# Altium footprint library Altium_Box_Header.PcbLib: 219 footprints (part 2 of 14)
Each footprint in its own frame and in the unit in brackets; x right, y up, seen from the top. Pads: shape width x height; smd on the part's side, far side on the other; paste and mask are expansions set on the pad; w line width, h text height; cw(c..) or ccw(c..) is an arc to the next point about the centre after c.
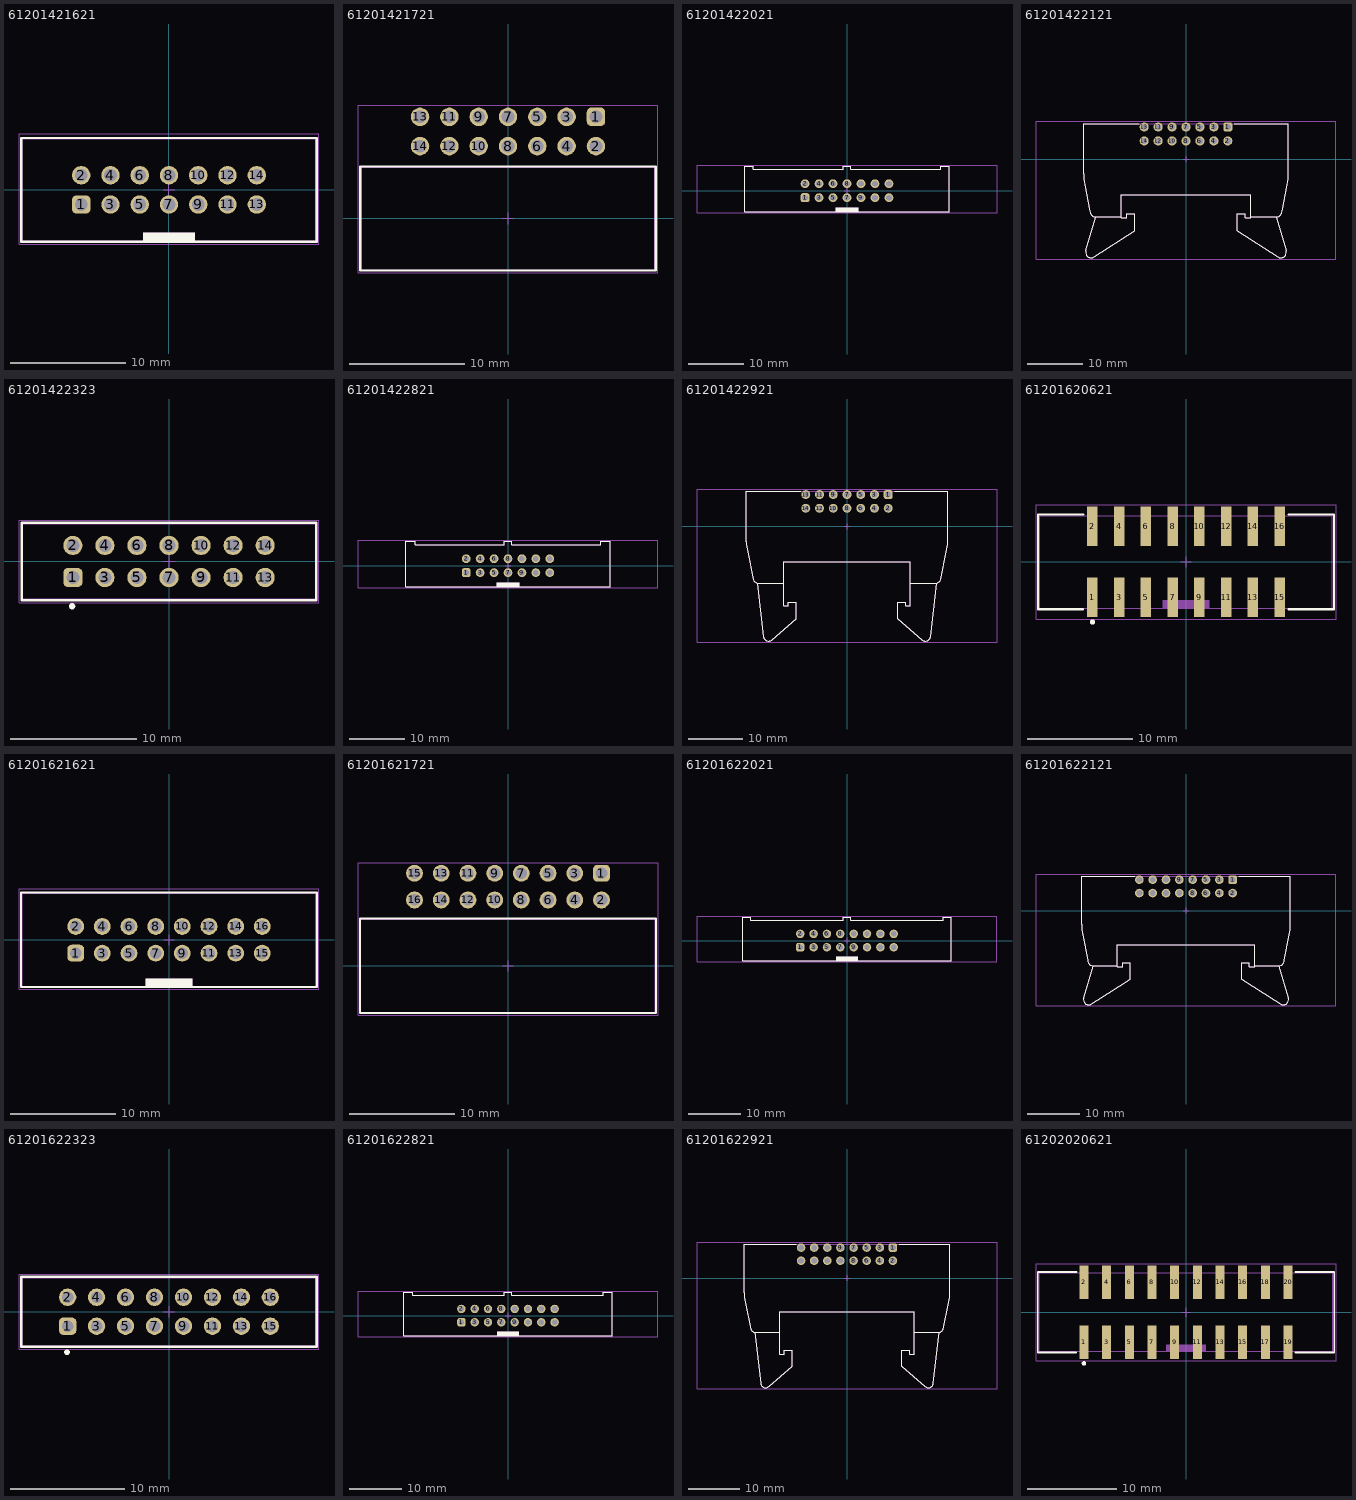
[diagram p1: the footprints below, top view; thin cyan lines are the x and y axes]

## 61201421621 [mm] "14 pins, straight, gold plating"
height 9.1
pads (14):
  rrect50% 1.6x1.6 hole 1.1: 1(-7.62,-1.27)
  round 1.6 hole 1.1: 2(-7.62,1.27) 3(-5.08,-1.27) 4(-5.08,1.27) 5(-2.54,-1.27) 6(-2.54,1.27) 7(0,-1.27) 8(0,1.27) 9(2.54,-1.27) 10(2.54,1.27) 11(5.08,-1.27) 12(5.08,1.27) 13(7.62,-1.27) 14(7.62,1.27)
Top Overlay:
  rectangle: -2.25,-4.5 2.25,-3.7
  lines w0.2: -12.82,-4.5 12.82,-4.5 12.82,4.5 -12.82,4.5 -12.82,-4.5
Top Designator:
  text ".Designator" at -7.498,-0.5 h1.5
Top Component Outline:
  rectangle: -2.25,-4.425 2.25,-3.7
  lines w0.1: -12.72,-4.425 -12.72,4.425 12.72,4.425 12.72,-4.425 -12.72,-4.425
Top 3D Body:
  rectangle: -2.25,-4.425 2.25,-3.7
  lines w0.1: -12.72,-4.425 12.72,-4.425 12.72,4.425 -12.72,4.425 -12.72,-4.425
Top Courtyard:
  lines w0.05: -13.02,-4.7 13.02,-4.7 13.02,4.85 -13.02,4.85 -13.02,-4.7
Top Component Center:
  lines w0.05: -0.5,0 0.5,0 ; 0,-0.5 0,0.5
3D body "61201421621.stp": height 9.13, standoff -2.98, extent -12.72,-4.425 12.72,4.75

## 61201421721 [mm] "14 pins, right angled, gold plating"
height 9.1
pads (14):
  rrect50% 1.6x1.6 hole 1.1: 1(7.62,8.805)
  round 1.6 hole 1.1: 2(7.62,6.265) 3(5.08,8.805) 4(5.08,6.265) 5(2.54,8.805) 6(2.54,6.265) 7(0,8.805) 8(0,6.265) 9(-2.54,8.805) 10(-2.54,6.265) 11(-5.08,8.805) 12(-5.08,6.265) 13(-7.62,8.805) 14(-7.62,6.265)
Top Overlay:
  lines w0.2: -12.795,-4.5 -12.795,4.5 12.795,4.5 12.795,-4.5 -12.795,-4.5
Top Designator:
  text ".Designator" at -7.498,-0.5 h1.5
Top Component Outline:
  lines w0.1: -12.72,-4.425 -12.72,4.425 12.72,4.425 12.72,-4.425 -12.72,-4.425
Top 3D Body:
  lines w0.1: -12.72,-4.425 12.72,-4.425 12.72,4.425 -12.72,4.425 -12.72,-4.425
Top Courtyard:
  lines w0.05: -12.995,-4.7 12.995,-4.7 12.995,9.805 -12.995,9.805 -12.995,-4.7
Top Component Center:
  lines w0.05: -0.5,0 0.5,0 ; 0,-0.5 0,0.5
3D body "61201421721.stp": height 9.23, standoff -2.88, extent -12.72,-4.425 12.72,9.125

## 61201422021 [mm] "14 pins, straight, short lever, gold plating"
height 24.5
pads (14):
  rrect50% 1.6x1.6 hole 1.02: 1(-7.62,-1.27)
  round 1.6 hole 1.02: 2(-7.62,1.27) 3(-5.08,-1.27) 4(-5.08,1.27) 5(-2.54,-1.27) 6(-2.54,1.27) 7(0,-1.27) 8(0,1.27) 9(2.54,-1.27) 10(2.54,1.27) 11(5.08,-1.27) 12(5.08,1.27) 13(7.62,-1.27) 14(7.62,1.27)
Top Overlay:
  rectangle: -2.1,-3.85 2.1,-3.05
  lines w0.2: -0.7,4.45 0.7,4.45 0.7,3.85 16.99,3.85 16.99,4.45 18.54,4.45 18.54,-3.85 -18.54,-3.85 -18.54,4.45 -16.99,4.45 -16.99,3.85 -0.7,3.85 -0.7,4.45 ; -0.7,4.45 -0.7,4.45
Top Designator:
  text ".Designator" at -7.498,-0.5 h1.5
Top Component Outline:
  rectangle: -2.1,-3.85 2.1,-3.05
  lines w0.1: -0.7,4.45 -0.7,3.85 -16.99,3.85 -16.99,4.45 -18.54,4.45 -18.54,-3.85 18.54,-3.85 18.54,4.45 16.99,4.45 16.99,3.85 0.7,3.85 0.7,4.45 -0.7,4.45 ; -0.7,4.45 -0.7,4.45
Top 3D Body:
  rectangle: -2.1,-3.85 2.1,-3.05
  lines w0.1: -0.7,4.45 0.7,4.45 0.7,3.85 16.99,3.85 16.99,4.45 18.54,4.45 18.54,-3.85 -18.54,-3.85 -18.54,4.45 -16.99,4.45 -16.99,3.85 -0.7,3.85 -0.7,4.45 ; -0.7,4.45 -0.7,4.45
Top Courtyard:
  lines w0.05: -27.24,-4.05 27.24,-4.05 27.24,4.65 -27.24,4.65 -27.24,-4.05
Top Component Center:
  lines w0.05: -0.5,0 0.5,0 ; 0,-0.5 0,0.5
3D body "61201422021.stp": height 24.55, standoff -3.35, extent -18.64,-3.85 18.641,4.45

## 61201422121 [mm] "14 pins, right angeled, short lever, gold plating"
height 8.3
pads (14):
  rrect50% 1.65x1.65 hole 1.1: 1(7.62,5.88)
  round 1.65 hole 1.1: 2(7.62,3.34) 3(5.08,5.88) 4(5.08,3.34) 5(2.54,5.88) 6(2.54,3.34) 7(0,5.88) 8(0,3.34) 9(-2.54,5.88) 10(-2.54,3.34) 11(-5.08,5.88) 12(-5.08,3.34) 13(-7.62,5.88) 14(-7.62,3.34)
Top Overlay:
  lines w0.2: -17.504,-9.501 -18.446,-4.611 cw(c-8.64,-2.65) -18.64,-2.65 -18.64,6.5 -8.54,6.5 ; -17.5,-9.5 ccw(c-16.5,-9.5) -16.5,-10.5 ; -16.595,-10.5 -11.84,-10.5 ; -16.414,-10.601 -18.247,-16.691 ccw(c-17.29,-16.98) -16.74,-17.815 -9.34,-13.08 -9.34,-9.98 -10.84,-9.98 -10.84,-10.69 -11.84,-10.69 -11.84,-6.5 11.84,-6.5 11.84,-10.69 10.84,-10.69 10.84,-9.98 9.34,-9.98 9.34,-13.08 16.74,-17.816 ccw(c17.29,-16.98) 18.247,-16.691 16.414,-10.601 ; 8.79,6.5 18.64,6.5 18.64,-2.65 cw(c8.64,-2.65) 18.446,-4.611 17.504,-9.501 ; 11.84,-10.5 16.595,-10.5 ; 16.5,-10.5 ccw(c16.5,-9.5) 17.5,-9.5
Top Designator:
  text ".Designator" at -7.498,-0.5 h1.5
Top Component Outline:
  lines w0.1: -17.504,-9.501 -18.446,-4.611 cw(c-8.64,-2.65) -18.64,-2.65 -18.64,6.5 18.64,6.5 18.64,-2.65 cw(c8.64,-2.65) 18.446,-4.611 17.504,-9.501 ; -17.5,-9.5 ccw(c-16.5,-9.5) -16.5,-10.5 ; -16.595,-10.5 -11.84,-10.5 ; -16.414,-10.601 -18.247,-16.691 ccw(c-17.29,-16.98) -16.74,-17.815 -9.34,-13.08 -9.34,-9.98 -10.84,-9.98 -10.84,-10.69 -11.84,-10.69 -11.84,-6.5 11.84,-6.5 11.84,-10.69 10.84,-10.69 10.84,-9.98 9.34,-9.98 9.34,-13.08 16.74,-17.816 ccw(c17.29,-16.98) 18.247,-16.691 16.414,-10.601 ; 11.84,-10.5 16.595,-10.5 ; 16.5,-10.5 ccw(c16.5,-9.5) 17.5,-9.5
Top 3D Body:
  lines w0.1: -17.504,-9.501 -18.446,-4.611 cw(c-8.64,-2.65) -18.64,-2.65 -18.64,6.5 18.64,6.5 18.64,-2.65 cw(c8.64,-2.65) 18.446,-4.611 17.504,-9.501 ; -17.5,-9.5 ccw(c-16.5,-9.5) -16.5,-10.5 ; -16.595,-10.5 -11.84,-10.5 ; -16.414,-10.601 -18.247,-16.691 ccw(c-17.29,-16.98) -16.74,-17.815 -9.34,-13.08 -9.34,-9.98 -10.84,-9.98 -10.84,-10.69 -11.84,-10.69 -11.84,-6.5 11.84,-6.5 11.84,-10.69 10.84,-10.69 10.84,-9.98 9.34,-9.98 9.34,-13.08 16.74,-17.816 ccw(c17.29,-16.98) 18.247,-16.691 16.414,-10.601 ; 11.84,-10.5 16.595,-10.5 ; 16.5,-10.5 ccw(c16.5,-9.5) 17.5,-9.5
Top Courtyard:
  lines w0.05: -27.34,-18.2 27.34,-18.2 27.34,6.88 -27.34,6.88 -27.34,-18.2
Top Component Center:
  lines w0.05: -0.5,0 0.5,0 ; 0,-0.5 0,0.5
3D body "61201422121.stp": height 8.35, standoff -3.35, extent -18.64,-18 18.64,6.5

## 61201422323 [mm] "14 pins, selective gold plating"
height 7.3
pads (14):
  rrect50% 1.52x1.52 hole 1.02: 1(-7.62,-1.27)
  round 1.52 hole 1.02: 2(-7.62,1.27) 3(-5.08,-1.27) 4(-5.08,1.27) 5(-2.54,-1.27) 6(-2.54,1.27) 7(0,-1.27) 8(0,1.27) 9(2.54,-1.27) 10(2.54,1.27) 11(5.08,-1.27) 12(5.08,1.27) 13(7.62,-1.27) 14(7.62,1.27)
Top Overlay:
  circle w0.25: c-7.68,-3.55 r0.125
  lines w0.2: -11.69,-3.075 -11.69,3.075 11.69,3.075 11.69,-3.075 -11.69,-3.075
Top Designator:
  text ".Designator" at -7.498,-0.5 h1.5
Top Component Outline:
  lines w0.1: -11.615,-3 11.615,-3 11.615,3 -11.615,3 -11.615,-3
Top 3D Body:
  lines w0.1: -11.615,-3 -11.615,3 11.615,3 11.615,-3 -11.615,-3
Top Courtyard:
  lines w0.05: -11.89,-3.275 -11.89,3.275 11.89,3.275 11.89,-3.275 -11.89,-3.275
Top Component Center:
  lines w0.05: -0.5,0 0.5,0 ; 0,-0.5 0,0.5
3D body "61201422323.stp": height 9.33, standoff -3.27, extent -11.615,-3 11.615,3

## 61201422821 [mm] "14 pins, straight, long lever, gold plating"
height 28
pads (14):
  rrect50% 1.6x1.6 hole 1.02: 1(-7.62,-1.27)
  round 1.6 hole 1.02: 2(-7.62,1.27) 3(-5.08,-1.27) 4(-5.08,1.27) 5(-2.54,-1.27) 6(-2.54,1.27) 7(0,-1.27) 8(0,1.27) 9(2.54,-1.27) 10(2.54,1.27) 11(5.08,-1.27) 12(5.08,1.27) 13(7.62,-1.27) 14(7.62,1.27)
Top Overlay:
  rectangle: -2.1,-3.85 2.1,-3.04
  lines w0.2: -18.64,-3.85 18.64,-3.85 18.64,4.45 16.91,4.45 16.91,3.85 0.7,3.85 0.7,4.45 -0.7,4.45 -0.7,3.85 -16.91,3.85 -16.91,4.45 -18.64,4.45 -18.64,-3.85
Top Designator:
  text ".Designator" at -7.498,-0.5 h1.5
Top Component Outline:
  rectangle: -2.1,-3.85 2.1,-3.04
  lines w0.1: -18.64,-3.85 -18.64,4.45 -16.91,4.45 -16.91,3.85 -0.7,3.85 -0.7,4.45 0.7,4.45 0.7,3.85 16.91,3.85 16.91,4.45 18.64,4.45 18.64,-3.85 -18.64,-3.85
Top 3D Body:
  rectangle: -2.1,-3.85 2.1,-3.04
  lines w0.1: -18.64,-3.85 18.64,-3.85 18.64,4.45 16.91,4.45 16.91,3.85 0.7,3.85 0.7,4.45 -0.7,4.45 -0.7,3.85 -16.91,3.85 -16.91,4.45 -18.64,4.45 -18.64,-3.85
Top Courtyard:
  lines w0.05: -27.34,-4.05 27.34,-4.05 27.34,4.65 -27.34,4.65 -27.34,-4.05
Top Component Center:
  lines w0.05: -0.5,0 0.5,0 ; 0,-0.5 0,0.5
3D body "61201422821 (rev1).stp": height 27.84, standoff -3.35, extent -18.64,-3.86 18.64,4.45

## 61201422921 [mm] "14 pins, right angeled, long lever, gold plating"
height 10.8
pads (14):
  rrect50% 1.65x1.65 hole 1.1: 1(7.62,5.88)
  round 1.65 hole 1.1: 2(7.62,3.34) 3(5.08,5.88) 4(5.08,3.34) 5(2.54,5.88) 6(2.54,3.34) 7(0,5.88) 8(0,3.34) 9(-2.54,5.88) 10(-2.54,3.34) 11(-5.08,5.88) 12(-5.08,3.34) 13(-7.62,5.88) 14(-7.62,3.34)
Top Overlay:
  lines w0.2: -18.64,-2.81 -18.64,6.5 -8.59,6.5 ; -18.635,-2.81 ccw(c-8.64,-2.51) -18.394,-4.714 -17.349,-9.884 ; -17.343,-9.883 ccw(c-16.42,-9.5) -16.42,-10.5 -11.74,-10.5 ; -16.604,-10.5 -15.458,-20.372 ccw(c-14.47,-20.22) -13.812,-20.973 -9.341,-17.109 ; -9.34,-17.11 -9.34,-14.01 -10.84,-14.01 -10.84,-14.72 -11.74,-14.72 -11.74,-6.5 11.74,-6.5 11.74,-14.72 10.84,-14.72 10.84,-14.01 9.34,-14.01 9.34,-17.11 ; 8.79,6.5 18.64,6.5 18.64,-2.81 ; 9.341,-17.109 13.813,-20.973 ccw(c14.47,-20.22) 15.458,-20.372 16.604,-10.5 ; 11.74,-10.5 16.42,-10.5 ccw(c16.42,-9.5) 17.344,-9.883 ; 17.349,-9.884 18.394,-4.714 ccw(c8.64,-2.51) 18.636,-2.81
Top Designator:
  text ".Designator" at -7.498,-0.5 h1.5
Top Component Outline:
  lines w0.1: -18.64,-2.81 -18.64,6.5 18.64,6.5 18.64,-2.81 ; -18.635,-2.81 ccw(c-8.64,-2.51) -18.394,-4.714 -17.349,-9.884 ; -17.343,-9.883 ccw(c-16.42,-9.5) -16.42,-10.5 -11.74,-10.5 ; -16.604,-10.5 -15.458,-20.372 ccw(c-14.47,-20.22) -13.812,-20.973 -9.341,-17.109 ; -9.34,-17.11 -9.34,-14.01 -10.84,-14.01 -10.84,-14.72 -11.74,-14.72 -11.74,-6.5 11.74,-6.5 11.74,-14.72 10.84,-14.72 10.84,-14.01 9.34,-14.01 9.34,-17.11 ; 9.341,-17.109 13.813,-20.973 ccw(c14.47,-20.22) 15.458,-20.372 16.604,-10.5 ; 11.74,-10.5 16.42,-10.5 ccw(c16.42,-9.5) 17.344,-9.883 ; 17.349,-9.884 18.394,-4.714 ccw(c8.64,-2.51) 18.636,-2.81
Top 3D Body:
  lines w0.1: -18.64,-2.81 -18.64,6.5 18.64,6.5 18.64,-2.81 ; -18.635,-2.81 ccw(c-8.64,-2.51) -18.394,-4.714 -17.349,-9.884 ; -17.343,-9.883 ccw(c-16.42,-9.5) -16.42,-10.5 -11.74,-10.5 ; -16.604,-10.5 -15.458,-20.372 ccw(c-14.47,-20.22) -13.812,-20.973 -9.341,-17.109 ; -9.34,-17.11 -9.34,-14.01 -10.84,-14.01 -10.84,-14.72 -11.74,-14.72 -11.74,-6.5 11.74,-6.5 11.74,-14.72 10.84,-14.72 10.84,-14.01 9.34,-14.01 9.34,-17.11 ; 9.341,-17.109 13.813,-20.973 ccw(c14.47,-20.22) 15.458,-20.372 16.604,-10.5 ; 11.74,-10.5 16.42,-10.5 ccw(c16.42,-9.5) 17.344,-9.883 ; 17.349,-9.884 18.394,-4.714 ccw(c8.64,-2.51) 18.636,-2.81
Top Courtyard:
  lines w0.05: -27.74,-21.41 -27.74,6.88 27.74,6.88 27.74,-21.41 -27.74,-21.41
Top Component Center:
  lines w0.05: -0.5,0 0.5,0 ; 0,-0.5 0,0.5
3D body "61201422921 (rev1).stp": height 8.35, standoff -2.35, extent -18.64,-21.221 18.64,6.5

## 61201620621 [mm] "16 pins, SMT, straight, gold plating"
height 9.2
pads (16):
  rect 1x3.75 smd: 1(-8.89,-3.375) 2(-8.89,3.375) 3(-6.35,-3.375) 4(-6.35,3.375) 5(-3.81,-3.375) 6(-3.81,3.375) 7(-1.27,-3.375) 8(-1.27,3.375) 9(1.27,-3.375) 10(1.27,3.375) 11(3.81,-3.375) 12(3.81,3.375) 13(6.35,-3.375) 14(6.35,3.375) 15(8.89,-3.375) 16(8.89,3.375)
Top Overlay:
  circle w0.25: c-8.89,-5.725 r0.125
  lines w0.2: -9.78,-4.5 -14.06,-4.5 -14.06,4.5 -9.73,4.5 ; 9.73,-4.5 14.06,-4.5 14.06,4.5 9.73,4.5
Top Designator:
  text ".Designator" at -7.498,-0.5 h1.5
Top Component Outline:
  rectangle: -2.25,-4.4 2.25,-3.6
  lines w0.1: -13.91,-4.4 13.91,-4.4 13.91,4.4 -13.91,4.4 -13.91,-4.4
Top 3D Body:
  rectangle: -2.25,-4.4 2.25,-3.6
  lines w0.1: -13.91,-4.4 -13.91,4.4 13.91,4.4 13.91,-4.4 -13.91,-4.4
Top Courtyard:
  lines w0.05: -14.26,-5.45 -14.26,5.45 14.26,5.45 14.26,-5.45 -14.26,-5.45
Top Component Center:
  lines w0.05: -0.5,0 0.5,0 ; 0,-0.5 0,0.5
3D body "61201620621.stp": height 10.2, standoff 0.01, extent -13.97,-4.75 13.97,4.75

## 61201621621 [mm] "16 pins, straight, gold plating"
height 9.1
pads (16):
  rrect50% 1.6x1.6 hole 1.1: 1(-8.89,-1.27)
  round 1.6 hole 1.1: 2(-8.89,1.27) 3(-6.35,-1.27) 4(-6.35,1.27) 5(-3.81,-1.27) 6(-3.81,1.27) 7(-1.27,-1.27) 8(-1.27,1.27) 9(1.27,-1.27) 10(1.27,1.27) 11(3.81,-1.27) 12(3.81,1.27) 13(6.35,-1.27) 14(6.35,1.27) 15(8.89,-1.27) 16(8.89,1.27)
Top Overlay:
  rectangle: -2.25,-4.5 2.25,-3.7
  lines w0.2: -14.09,-4.5 14.09,-4.5 14.09,4.5 -14.09,4.5 -14.09,-4.5
Top Designator:
  text ".Designator" at -7.498,-0.5 h1.5
Top Component Outline:
  rectangle: -2.25,-4.425 2.25,-3.7
  lines w0.1: -13.99,-4.425 -13.99,4.425 13.99,4.425 13.99,-4.425 -13.99,-4.425
Top 3D Body:
  rectangle: -2.25,-4.425 2.25,-3.7
  lines w0.1: -13.99,-4.425 13.99,-4.425 13.99,4.425 -13.99,4.425 -13.99,-4.425
Top Courtyard:
  lines w0.05: -14.29,-4.7 14.29,-4.7 14.29,4.85 -14.29,4.85 -14.29,-4.7
Top Component Center:
  lines w0.05: -0.5,0 0.5,0 ; 0,-0.5 0,0.5
3D body "61201621621.stp": height 9.13, standoff -2.98, extent -13.99,-4.425 13.99,4.75

## 61201621721 [mm] "16 pins, right angled, gold plating"
height 9.1
pads (16):
  rrect50% 1.6x1.6 hole 1.1: 1(8.89,8.805)
  round 1.6 hole 1.1: 2(8.89,6.265) 3(6.35,8.805) 4(6.35,6.265) 5(3.81,8.805) 6(3.81,6.265) 7(1.27,8.805) 8(1.27,6.265) 9(-1.27,8.805) 10(-1.27,6.265) 11(-3.81,8.805) 12(-3.81,6.265) 13(-6.35,8.805) 14(-6.35,6.265) 15(-8.89,8.805) 16(-8.89,6.265)
Top Overlay:
  lines w0.2: -14.065,-4.5 14.065,-4.5 14.065,4.5 -14.065,4.5 -14.065,-4.5
Top Designator:
  text ".Designator" at -7.498,-0.5 h1.5
Top Component Outline:
  lines w0.1: -13.99,-4.425 13.99,-4.425 13.99,4.425 -13.99,4.425 -13.99,-4.425
Top 3D Body:
  lines w0.1: -13.99,-4.425 -13.99,4.425 13.99,4.425 13.99,-4.425 -13.99,-4.425
Top Courtyard:
  lines w0.05: -14.265,-4.7 -14.265,9.805 14.265,9.805 14.265,-4.7 -14.265,-4.7
Top Component Center:
  lines w0.05: -0.5,0 0.5,0 ; 0,-0.5 0,0.5
3D body "61201621721.stp": height 9.23, standoff -2.88, extent -13.99,-4.425 13.99,9.125

## 61201622021 [mm] "16 pins, straight, short lever, gold plating"
height 24.5
pads (16):
  rrect50% 1.6x1.6 hole 1.02: 1(-8.89,-1.27)
  round 1.6 hole 1.02: 2(-8.89,1.27) 3(-6.35,-1.27) 4(-6.35,1.27) 5(-3.81,-1.27) 6(-3.81,1.27) 7(-1.27,-1.27) 8(-1.27,1.27) 9(1.27,-1.27) 10(1.27,1.27) 11(3.81,-1.27) 12(3.81,1.27) 13(6.35,-1.27) 14(6.35,1.27) 15(8.89,-1.27) 16(8.89,1.27)
Top Overlay:
  rectangle: -2.1,-3.85 2.1,-3.05
  lines w0.2: -0.7,4.45 0.7,4.45 0.7,3.85 18.26,3.85 18.26,4.45 19.81,4.45 19.81,-3.85 -19.81,-3.85 -19.81,4.45 -18.26,4.45 -18.26,3.85 -0.7,3.85 -0.7,4.45 ; -0.7,4.45 -0.7,4.45
Top Designator:
  text ".Designator" at -7.498,-0.5 h1.5
Top Component Outline:
  rectangle: -2.1,-3.85 2.1,-3.05
  lines w0.1: -0.7,4.45 -0.7,3.85 -18.26,3.85 -18.26,4.45 -19.81,4.45 -19.81,-3.85 19.81,-3.85 19.81,4.45 18.26,4.45 18.26,3.85 0.7,3.85 0.7,4.45 -0.7,4.45 ; -0.7,4.45 -0.7,4.45
Top 3D Body:
  rectangle: -2.1,-3.85 2.1,-3.05
  lines w0.1: -0.7,4.45 0.7,4.45 0.7,3.85 18.26,3.85 18.26,4.45 19.81,4.45 19.81,-3.85 -19.81,-3.85 -19.81,4.45 -18.26,4.45 -18.26,3.85 -0.7,3.85 -0.7,4.45 ; -0.7,4.45 -0.7,4.45
Top Courtyard:
  lines w0.05: -28.51,-4.05 -28.51,4.65 28.51,4.65 28.51,-4.05 -28.51,-4.05
Top Component Center:
  lines w0.05: -0.5,0 0.5,0 ; 0,-0.5 0,0.5
3D body "61201622021.stp": height 24.55, standoff -3.35, extent -19.91,-3.85 19.911,4.45

## 61201622121 [mm] "16 pins, right angeled, short lever, gold plating"
height 8.3
pads (16):
  rrect50% 1.65x1.65 hole 1.1: 1(8.89,5.88)
  round 1.65 hole 1.1: 2(8.89,3.34) 3(6.35,5.88) 4(6.35,3.34) 5(3.81,5.88) 6(3.81,3.34) 7(1.27,5.88) 8(1.27,3.34) 9(-1.27,5.88) 10(-1.27,3.34) 11(-3.81,5.88) 12(-3.81,3.34) 13(-6.35,5.88) 14(-6.35,3.34) 15(-8.89,5.88) 16(-8.89,3.34)
Top Overlay:
  lines w0.2: -18.774,-9.501 -19.716,-4.611 cw(c-9.91,-2.65) -19.91,-2.65 -19.91,6.5 -9.81,6.5 ; -18.77,-9.5 ccw(c-17.77,-9.5) -17.77,-10.5 ; -17.865,-10.5 -13.11,-10.5 ; -17.684,-10.601 -19.517,-16.691 ccw(c-18.56,-16.98) -18.01,-17.815 -10.61,-13.08 -10.61,-9.98 -12.11,-9.98 -12.11,-10.69 -13.11,-10.69 -13.11,-6.5 13.11,-6.5 13.11,-10.69 12.11,-10.69 12.11,-9.98 10.61,-9.98 10.61,-13.08 18.01,-17.816 ccw(c18.56,-16.98) 19.517,-16.691 17.684,-10.601 ; 10.06,6.5 19.91,6.5 19.91,-2.65 cw(c9.91,-2.65) 19.716,-4.611 18.774,-9.501 ; 13.11,-10.5 17.865,-10.5 ; 17.77,-10.5 ccw(c17.77,-9.5) 18.77,-9.5
Top Designator:
  text ".Designator" at -7.498,-0.5 h1.5
Top Component Outline:
  lines w0.1: -18.774,-9.501 -19.716,-4.611 cw(c-9.91,-2.65) -19.91,-2.65 -19.91,6.5 19.91,6.5 19.91,-2.65 cw(c9.91,-2.65) 19.716,-4.611 18.774,-9.501 ; -18.77,-9.5 ccw(c-17.77,-9.5) -17.77,-10.5 ; -17.865,-10.5 -13.11,-10.5 ; -17.684,-10.601 -19.517,-16.691 ccw(c-18.56,-16.98) -18.01,-17.815 -10.61,-13.08 -10.61,-9.98 -12.11,-9.98 -12.11,-10.69 -13.11,-10.69 -13.11,-6.5 13.11,-6.5 13.11,-10.69 12.11,-10.69 12.11,-9.98 10.61,-9.98 10.61,-13.08 18.01,-17.816 ccw(c18.56,-16.98) 19.517,-16.691 17.684,-10.601 ; 13.11,-10.5 17.865,-10.5 ; 17.77,-10.5 ccw(c17.77,-9.5) 18.77,-9.5
Top 3D Body:
  lines w0.1: -18.774,-9.501 -19.716,-4.611 cw(c-9.91,-2.65) -19.91,-2.65 -19.91,6.5 19.91,6.5 19.91,-2.65 cw(c9.91,-2.65) 19.716,-4.611 18.774,-9.501 ; -18.77,-9.5 ccw(c-17.77,-9.5) -17.77,-10.5 ; -17.865,-10.5 -13.11,-10.5 ; -17.684,-10.601 -19.517,-16.691 ccw(c-18.56,-16.98) -18.01,-17.815 -10.61,-13.08 -10.61,-9.98 -12.11,-9.98 -12.11,-10.69 -13.11,-10.69 -13.11,-6.5 13.11,-6.5 13.11,-10.69 12.11,-10.69 12.11,-9.98 10.61,-9.98 10.61,-13.08 18.01,-17.816 ccw(c18.56,-16.98) 19.517,-16.691 17.684,-10.601 ; 13.11,-10.5 17.865,-10.5 ; 17.77,-10.5 ccw(c17.77,-9.5) 18.77,-9.5
Top Courtyard:
  lines w0.05: -28.61,-18.2 -28.61,6.88 28.61,6.88 28.61,-18.2 -28.61,-18.2
Top Component Center:
  lines w0.05: -0.5,0 0.5,0 ; 0,-0.5 0,0.5
3D body "61201622121.stp": height 8.35, standoff -3.35, extent -19.91,-18 19.91,6.5

## 61201622323 [mm] "16 pins, selective gold plating"
height 7.3
pads (16):
  rrect50% 1.52x1.52 hole 1.02: 1(-8.89,-1.27)
  round 1.52 hole 1.02: 2(-8.89,1.27) 3(-6.35,-1.27) 4(-6.35,1.27) 5(-3.81,-1.27) 6(-3.81,1.27) 7(-1.27,-1.27) 8(-1.27,1.27) 9(1.27,-1.27) 10(1.27,1.27) 11(3.81,-1.27) 12(3.81,1.27) 13(6.35,-1.27) 14(6.35,1.27) 15(8.89,-1.27) 16(8.89,1.27)
Top Overlay:
  circle w0.25: c-8.95,-3.55 r0.125
  lines w0.2: -12.96,-3.075 12.96,-3.075 12.96,3.075 -12.96,3.075 -12.96,-3.075
Top Designator:
  text ".Designator" at -7.498,-0.5 h1.5
Top Component Outline:
  lines w0.1: -12.885,-3 -12.885,3 12.885,3 12.885,-3 -12.885,-3
Top 3D Body:
  lines w0.1: -12.885,-3 12.885,-3 12.885,3 -12.885,3 -12.885,-3
Top Courtyard:
  lines w0.05: -13.16,-3.275 13.16,-3.275 13.16,3.275 -13.16,3.275 -13.16,-3.275
Top Component Center:
  lines w0.05: -0.5,0 0.5,0 ; 0,-0.5 0,0.5
3D body "61201622323.stp": height 9.33, standoff -3.27, extent -12.885,-3 12.885,3

## 61201622821 [mm] "16 pins, straight, long lever, gold plating"
height 28
pads (16):
  rrect50% 1.6x1.6 hole 1.02: 1(-8.89,-1.27)
  round 1.6 hole 1.02: 2(-8.89,1.27) 3(-6.35,-1.27) 4(-6.35,1.27) 5(-3.81,-1.27) 6(-3.81,1.27) 7(-1.27,-1.27) 8(-1.27,1.27) 9(1.27,-1.27) 10(1.27,1.27) 11(3.81,-1.27) 12(3.81,1.27) 13(6.35,-1.27) 14(6.35,1.27) 15(8.89,-1.27) 16(8.89,1.27)
Top Overlay:
  rectangle: -2.1,-3.85 2.1,-3.04
  lines w0.2: -19.91,-3.85 19.91,-3.85 19.91,4.45 18.18,4.45 18.18,3.85 0.7,3.85 0.7,4.45 -0.7,4.45 -0.7,3.85 -18.18,3.85 -18.18,4.45 -19.91,4.45 -19.91,-3.85
Top Designator:
  text ".Designator" at -7.498,-0.5 h1.5
Top Component Outline:
  rectangle: -2.1,-3.85 2.1,-3.04
  lines w0.1: -19.91,-3.85 -19.91,4.45 -18.18,4.45 -18.18,3.85 -0.7,3.85 -0.7,4.45 0.7,4.45 0.7,3.85 18.18,3.85 18.18,4.45 19.91,4.45 19.91,-3.85 -19.91,-3.85
Top 3D Body:
  rectangle: -2.1,-3.85 2.1,-3.04
  lines w0.1: -19.91,-3.85 19.91,-3.85 19.91,4.45 18.18,4.45 18.18,3.85 0.7,3.85 0.7,4.45 -0.7,4.45 -0.7,3.85 -18.18,3.85 -18.18,4.45 -19.91,4.45 -19.91,-3.85
Top Courtyard:
  lines w0.05: -28.61,-4.05 28.61,-4.05 28.61,4.65 -28.61,4.65 -28.61,-4.05
Top Component Center:
  lines w0.05: -0.5,0 0.5,0 ; 0,-0.5 0,0.5
3D body "61201622821 (rev1).stp": height 27.84, standoff -3.35, extent -19.91,-3.86 19.91,4.45

## 61201622921 [mm] "16 pins, right angeled, long lever, gold plating"
height 10.8
pads (16):
  rrect50% 1.65x1.65 hole 1.1: 1(8.89,5.88)
  round 1.65 hole 1.1: 2(8.89,3.34) 3(6.35,5.88) 4(6.35,3.34) 5(3.81,5.88) 6(3.81,3.34) 7(1.27,5.88) 8(1.27,3.34) 9(-1.27,5.88) 10(-1.27,3.34) 11(-3.81,5.88) 12(-3.81,3.34) 13(-6.35,5.88) 14(-6.35,3.34) 15(-8.89,5.88) 16(-8.89,3.34)
Top Overlay:
  lines w0.2: -19.91,-2.81 -19.91,6.5 -9.86,6.5 ; -19.906,-2.81 ccw(c-9.91,-2.51) -19.664,-4.714 -18.619,-9.884 ; -18.614,-9.883 ccw(c-17.69,-9.5) -17.69,-10.5 -13.01,-10.5 ; -17.874,-10.5 -16.728,-20.372 ccw(c-15.74,-20.22) -15.082,-20.973 -10.611,-17.109 ; -10.61,-17.11 -10.61,-14.01 -12.11,-14.01 -12.11,-14.72 -13.01,-14.72 -13.01,-6.5 13.01,-6.5 13.01,-14.72 12.11,-14.72 12.11,-14.01 10.61,-14.01 10.61,-17.11 ; 10.06,6.5 19.91,6.5 19.91,-2.81 ; 10.611,-17.109 15.082,-20.973 ccw(c15.74,-20.22) 16.728,-20.372 17.874,-10.5 ; 13.01,-10.5 17.69,-10.5 ccw(c17.69,-9.5) 18.614,-9.883 ; 18.619,-9.884 19.664,-4.714 ccw(c9.91,-2.51) 19.906,-2.81
Top Designator:
  text ".Designator" at -7.498,-0.5 h1.5
Top Component Outline:
  lines w0.1: -19.91,-2.81 -19.91,6.5 19.91,6.5 19.91,-2.81 ; -19.906,-2.81 ccw(c-9.91,-2.51) -19.664,-4.714 -18.619,-9.884 ; -18.614,-9.883 ccw(c-17.69,-9.5) -17.69,-10.5 -13.01,-10.5 ; -17.874,-10.5 -16.728,-20.372 ccw(c-15.74,-20.22) -15.082,-20.973 -10.611,-17.109 ; -10.61,-17.11 -10.61,-14.01 -12.11,-14.01 -12.11,-14.72 -13.01,-14.72 -13.01,-6.5 13.01,-6.5 13.01,-14.72 12.11,-14.72 12.11,-14.01 10.61,-14.01 10.61,-17.11 ; 10.611,-17.109 15.082,-20.973 ccw(c15.74,-20.22) 16.728,-20.372 17.874,-10.5 ; 13.01,-10.5 17.69,-10.5 ccw(c17.69,-9.5) 18.614,-9.883 ; 18.619,-9.884 19.664,-4.714 ccw(c9.91,-2.51) 19.906,-2.81
Top 3D Body:
  lines w0.1: -19.91,-2.81 -19.91,6.5 19.91,6.5 19.91,-2.81 ; -19.906,-2.81 ccw(c-9.91,-2.51) -19.664,-4.714 -18.619,-9.884 ; -18.614,-9.883 ccw(c-17.69,-9.5) -17.69,-10.5 -13.01,-10.5 ; -17.874,-10.5 -16.728,-20.372 ccw(c-15.74,-20.22) -15.082,-20.973 -10.611,-17.109 ; -10.61,-17.11 -10.61,-14.01 -12.11,-14.01 -12.11,-14.72 -13.01,-14.72 -13.01,-6.5 13.01,-6.5 13.01,-14.72 12.11,-14.72 12.11,-14.01 10.61,-14.01 10.61,-17.11 ; 10.611,-17.109 15.082,-20.973 ccw(c15.74,-20.22) 16.728,-20.372 17.874,-10.5 ; 13.01,-10.5 17.69,-10.5 ccw(c17.69,-9.5) 18.614,-9.883 ; 18.619,-9.884 19.664,-4.714 ccw(c9.91,-2.51) 19.906,-2.81
Top Courtyard:
  lines w0.05: -29.01,-21.41 29.01,-21.41 29.01,6.88 -29.01,6.88 -29.01,-21.41
Top Component Center:
  lines w0.05: -0.5,0 0.5,0 ; 0,-0.5 0,0.5
3D body "61201622921 (rev1).stp": height 8.35, standoff -2.35, extent -19.91,-21.221 19.91,6.5

## 61202020621 [mm] "20 pins, SMT, straight, gold plating"
height 9.2
pads (20):
  rect 1x3.75 smd: 1(-11.43,-3.375) 2(-11.43,3.375) 3(-8.89,-3.375) 4(-8.89,3.375) 5(-6.35,-3.375) 6(-6.35,3.375) 7(-3.81,-3.375) 8(-3.81,3.375) 9(-1.27,-3.375) 10(-1.27,3.375) 11(1.27,-3.375) 12(1.27,3.375) 13(3.81,-3.375) 14(3.81,3.375) 15(6.35,-3.375) 16(6.35,3.375) 17(8.89,-3.375) 18(8.89,3.375) 19(11.43,-3.375) 20(11.43,3.375)
Top Overlay:
  circle w0.25: c-11.43,-5.725 r0.125
  lines w0.2: -12.32,-4.5 -16.6,-4.5 -16.6,4.5 -12.27,4.5 ; 12.27,-4.5 16.6,-4.5 16.6,4.5 12.27,4.5
Top Designator:
  text ".Designator" at -7.498,-0.5 h1.5
Top Component Outline:
  rectangle: -2.25,-4.4 2.25,-3.6
  lines w0.1: -16.45,-4.4 16.45,-4.4 16.45,4.4 -16.45,4.4 -16.45,-4.4
Top 3D Body:
  rectangle: -2.25,-4.4 2.25,-3.6
  lines w0.1: -16.45,-4.4 -16.45,4.4 16.45,4.4 16.45,-4.4 -16.45,-4.4
Top Courtyard:
  lines w0.05: -16.8,-5.45 -16.8,5.45 16.8,5.45 16.8,-5.45 -16.8,-5.45
Top Component Center:
  lines w0.05: -0.5,0 0.5,0 ; 0,-0.5 0,0.5
3D body "61202020621.stp": height 10.2, standoff 0.01, extent -16.51,-4.75 16.51,4.75